# Altium footprint library FootPrintLib_8.PcbLib: 590 footprints (part 37 of 37)
Each footprint in its own frame and in the unit in brackets; x right, y up, seen from the top. Pads: shape width x height; smd on the part's side, far side on the other; paste and mask are expansions set on the pad; w line width, h text height; cw(c..) or ccw(c..) is an arc to the next point about the centre after c.
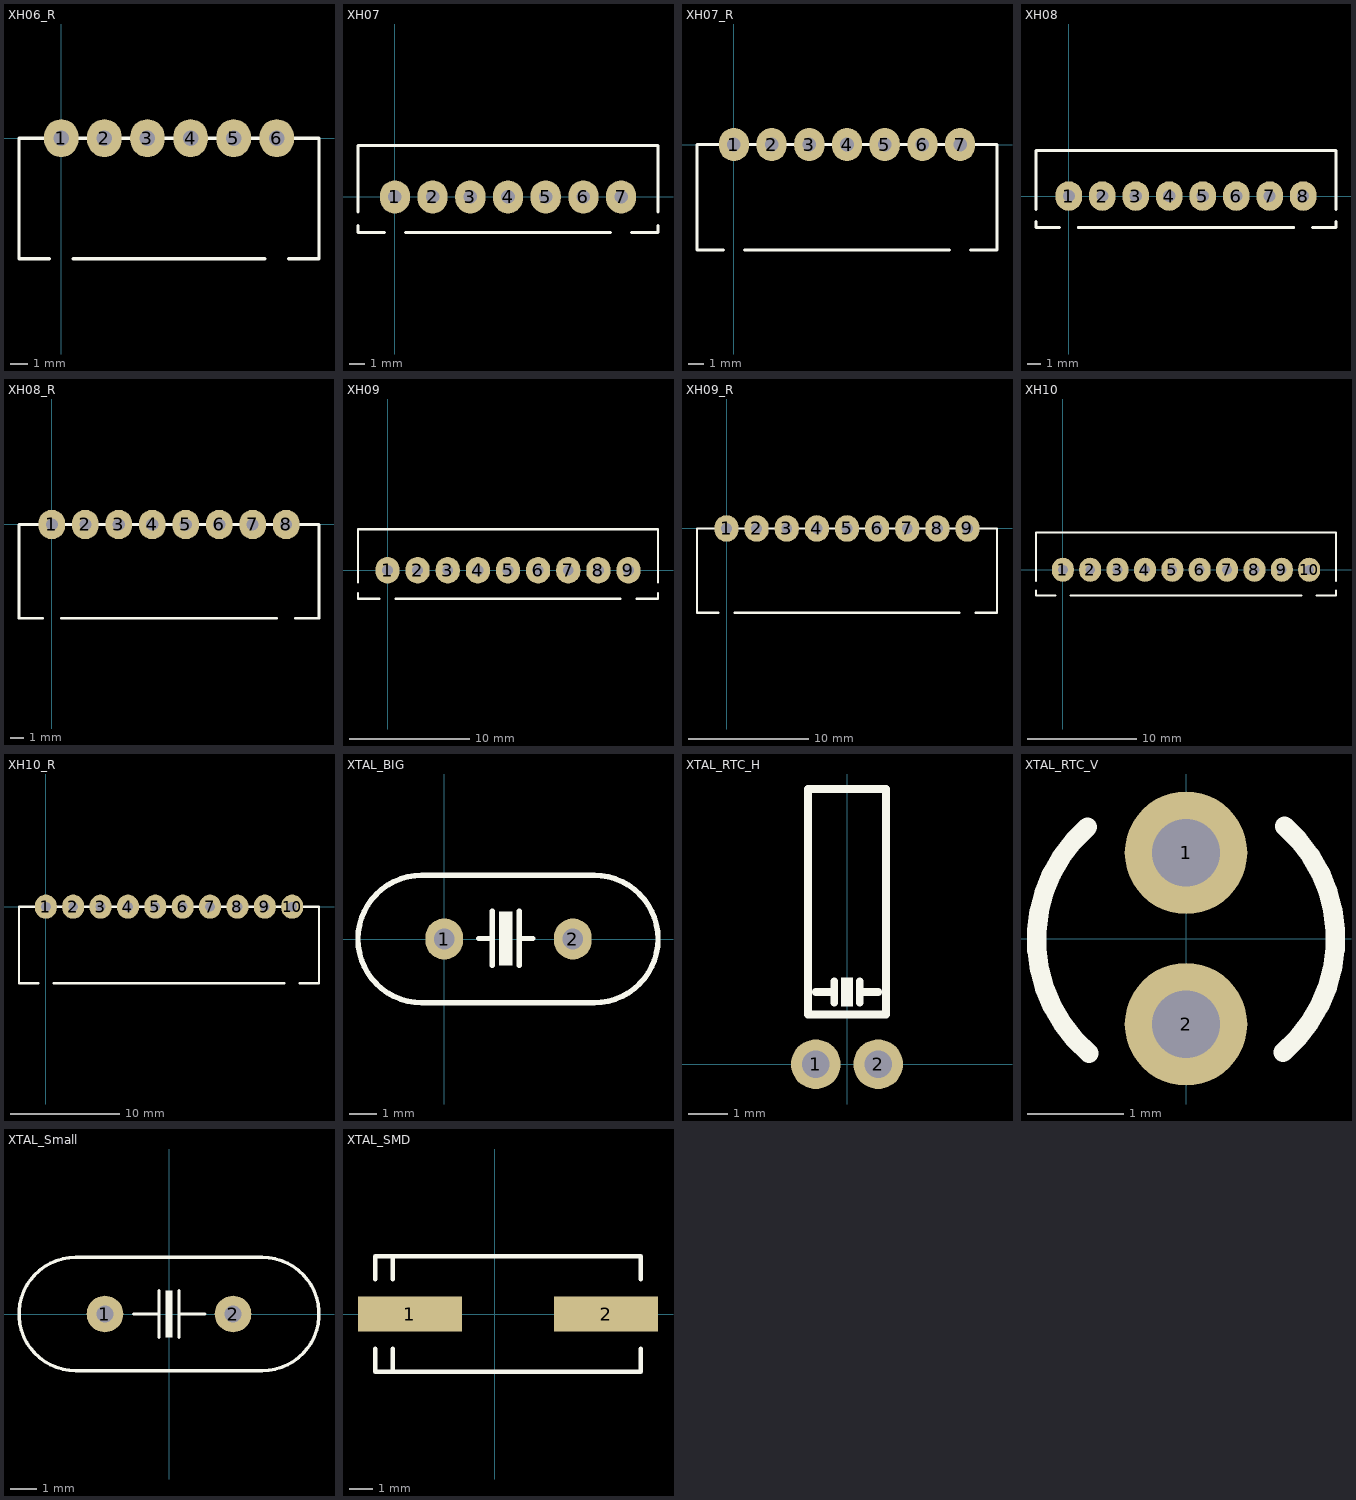
[diagram p36: the footprints below, top view; thin cyan lines are the x and y axes]

## XH06_R [mm] "XH Connector, Body 12.5 x 17.4 mm"
height 5.75
pads (6):
  oval 2x2.2 hole 0.9: 1(0,0) 2(2.5,0) 3(5,0) 4(7.5,0) 5(10,0) 6(12.5,0)
Top Overlay:
  lines w0.2: -0.7,-7 -2.45,-7 -2.45,0 14.95,0 14.95,-7 ; 0.7,-7 4.3,-7 ; 4.025,-7 9.3,-7 ; 8.2,-7 11.8,-7 ; 13.2,-7 14.925,-7
3D body: height 5.25, standoff 0.5, extent 14.95,0 14.95,0
3D body: height 5.25, standoff 0.5, extent 14.95,0 14.95,0
3D body: height 5.25, standoff 0.5, extent 14.95,0 14.95,0
3D body: height 5.25, standoff 0.5, extent -2.45,0 -2.45,0
3D body: height 5.25, standoff 0.5, extent -2.45,0 -2.45,0
3D body: height 7, standoff -3.3, extent -1.125,1.225 -1.125,1.225
3D body: height 5.25, standoff 0.5, extent -2.45,0 -2.45,0
3D body: height 5.25, standoff 0.5, extent -2.45,0 -2.45,0
3D body: height 2, standoff -2, extent -0.3,0.3 0.3,0.3
3D body: height 2, standoff -2, extent 2.2,0.3 2.8,0.3
3D body: height 2, standoff -2, extent 4.7,0.3 5.3,0.3
3D body: height 2, standoff -2, extent 7.2,0.3 7.8,0.3
3D body: height 2, standoff -2, extent 9.7,0.3 10.3,0.3
3D body: height 2, standoff -2, extent 12.2,0.3 12.8,0.3
3D body: height 5.25, standoff 0.5, extent -2.45,0 -2.45,0
3D body: height 5.25, standoff 0.5, extent -2.45,0 -2.45,0
3D body: height 5.25, standoff 0.5, extent 14.95,0 14.95,0
3D body: height 5.25, standoff 0.5, extent 14.95,0 14.95,0
3D body: height 5.25, standoff 0.5, extent -2.45,0 -2.45,0
3D body: height 5.25, standoff 0.5, extent -2.45,0 -2.45,0
3D body: height 5.25, standoff 0.5, extent 14.95,0 14.95,0
3D body: height 5.25, standoff 0.5, extent 14.95,0 14.95,0
3D body "XH06_R.step": height 5.75, standoff -2, extent -2.45,-7 14.95,0.3

## XH07 [mm] "XH Connector, Body 15 x 19.9 mm"
height 7
pads (7):
  oval 2x2.2 hole 0.9: 1(0,0) 2(2.5,0) 3(5,0) 4(7.5,0) 5(10,0) 6(12.5,0) 7(15,0)
Top Overlay:
  lines w0.2: -2.45,-1.9 -2.45,-2.35 -0.7,-2.35 ; -2.45,-1 -2.45,3.4 17.45,3.4 17.45,-1 ; 0.7,-2.35 3.375,-2.35 ; 3.3,-2.35 11.8,-2.35 ; 11.625,-2.35 14.3,-2.35 ; 15.7,-2.35 17.45,-2.35 17.45,-1.9
3D body "User Library-PW10-XX-M redPW10-7M.STEP": height 7, standoff -3.3, extent -2.55,-2.35 17.55,3.35

## XH07_R [mm] "XH Connector, Body 15 x 19.9 mm"
height 5.75
pads (7):
  oval 2x2.2 hole 0.9: 1(0,0) 2(2.5,0) 3(5,0) 4(7.5,0) 5(10,0) 6(12.5,0) 7(15,0)
Top Overlay:
  lines w0.2: -0.7,-7 -2.45,-7 -2.45,0 17.45,0 17.45,-7 ; 0.7,-7 4.3,-7 ; 4.025,-7 9.3,-7 ; 8.2,-7 11.8,-7 ; 10.7,-7 14.3,-7 ; 15.7,-7 17.425,-7
3D body: height 5.25, standoff 0.5, extent 17.45,0 17.45,0
3D body: height 5.25, standoff 0.5, extent 17.45,0 17.45,0
3D body: height 5.25, standoff 0.5, extent 17.45,0 17.45,0
3D body: height 5.25, standoff 0.5, extent -2.45,0 -2.45,0
3D body: height 5.25, standoff 0.5, extent -2.45,0 -2.45,0
3D body: height 7, standoff -3.3, extent -1.125,1.225 -1.125,1.225
3D body: height 5.25, standoff 0.5, extent -2.45,0 -2.45,0
3D body: height 5.25, standoff 0.5, extent -2.45,0 -2.45,0
3D body: height 2, standoff -2, extent -0.3,0.3 0.3,0.3
3D body: height 2, standoff -2, extent 2.2,0.3 2.8,0.3
3D body: height 2, standoff -2, extent 4.7,0.3 5.3,0.3
3D body: height 2, standoff -2, extent 7.2,0.3 7.8,0.3
3D body: height 2, standoff -2, extent 9.7,0.3 10.3,0.3
3D body: height 2, standoff -2, extent 12.2,0.3 12.8,0.3
3D body: height 2, standoff -2, extent 14.7,0.3 15.3,0.3
3D body: height 5.25, standoff 0.5, extent 17.45,0 17.45,0
3D body: height 5.25, standoff 0.5, extent 17.45,0 17.45,0
3D body: height 5.25, standoff 0.5, extent -2.45,0 -2.45,0
3D body: height 5.25, standoff 0.5, extent -2.45,0 -2.45,0
3D body: height 5.25, standoff 0.5, extent 17.45,0 17.45,0
3D body: height 5.25, standoff 0.5, extent 17.45,0 17.45,0
3D body: height 5.25, standoff 0.5, extent -2.45,0 -2.45,0
3D body: height 5.25, standoff 0.5, extent -2.45,0 -2.45,0
3D body "XH07_R.step": height 5.75, standoff -2, extent -2.45,-7 17.45,0.3

## XH08 [mm] "XH Connector, Body 17.5 x 22.4 mm"
height 7
pads (8):
  oval 2x2.2 hole 0.9: 1(0,0) 2(2.5,0) 3(5,0) 4(7.5,0) 5(10,0) 6(12.5,0) 7(15,0) 8(17.5,0)
Top Overlay:
  lines w0.2: -2.45,-1.9 -2.45,-2.35 -0.7,-2.35 ; -2.45,-1 -2.45,3.4 19.95,3.4 19.95,-1 ; 0.7,-2.35 3.375,-2.35 ; 3.3,-2.35 11.8,-2.35 ; 11.475,-2.35 16.8,-2.35 ; 18.2,-2.35 19.95,-2.35 19.95,-1.9
3D body "User Library-PW10-XX-M redPW10-8M.STEP": height 7, standoff -3.3, extent -2.55,-2.35 20.05,3.35

## XH08_R [mm] "XH Connector, Body 17.5 x 22.4 mm"
height 5.75
pads (8):
  oval 2x2.2 hole 0.9: 1(0,0) 2(2.5,0) 3(5,0) 4(7.5,0) 5(10,0) 6(12.5,0) 7(15,0) 8(17.5,0)
Top Overlay:
  lines w0.2: -0.7,-7 -2.45,-7 -2.45,0 19.95,0 19.95,-7 ; 0.7,-7 4.3,-7 ; 4.025,-7 9.3,-7 ; 8.2,-7 11.8,-7 ; 10.7,-7 14.3,-7 ; 13.2,-7 16.8,-7 ; 18.2,-7 19.925,-7
3D body: height 2, standoff -2, extent 17.2,0.3 17.8,0.3
3D body: height 2, standoff -2, extent -0.3,0.3 0.3,0.3
3D body: height 5.25, standoff 0.5, extent 19.95,0 19.95,0
3D body: height 5.25, standoff 0.5, extent 19.95,0 19.95,0
3D body: height 5.25, standoff 0.5, extent 19.95,0 19.95,0
3D body: height 5.25, standoff 0.5, extent 19.95,0 19.95,0
3D body: height 5.25, standoff 0.5, extent -2.45,0 -2.45,0
3D body: height 5.25, standoff 0.5, extent -2.45,0 -2.45,0
3D body: height 5.25, standoff 0.5, extent -2.45,0 -2.45,0
3D body: height 5.25, standoff 0.5, extent -2.45,0 -2.45,0
3D body: height 2, standoff -2, extent 14.7,0.3 15.3,0.3
3D body: height 2, standoff -2, extent 12.2,0.3 12.8,0.3
3D body: height 2, standoff -2, extent 9.7,0.3 10.3,0.3
3D body: height 2, standoff -2, extent 7.2,0.3 7.8,0.3
3D body: height 2, standoff -2, extent 4.7,0.3 5.3,0.3
3D body: height 2, standoff -2, extent 2.2,0.3 2.8,0.3
3D body: height 5.25, standoff 0.5, extent -2.45,0 -2.45,0
3D body: height 5.25, standoff 0.5, extent -2.45,0 -2.45,0
3D body: height 5.25, standoff 0.5, extent -2.45,0 -2.45,0
3D body: height 5.25, standoff 0.5, extent -2.45,0 -2.45,0
3D body: height 2, standoff -2, extent 14.7,0.3 15.3,0.3
3D body: height 2, standoff -2, extent 12.2,0.3 12.8,0.3
3D body: height 2, standoff -2, extent 9.7,0.3 10.3,0.3
3D body: height 2, standoff -2, extent 7.2,0.3 7.8,0.3
3D body: height 2, standoff -2, extent 4.7,0.3 5.3,0.3
3D body: height 2, standoff -2, extent 2.2,0.3 2.8,0.3
3D body: height 2, standoff -2, extent -0.3,0.3 0.3,0.3
3D body: height 5.25, standoff 0.5, extent -2.45,0 -2.45,0
3D body: height 5.25, standoff 0.5, extent -2.45,0 -2.45,0
3D body: height 7, standoff -3.3, extent -1.125,1.225 -1.125,1.225
3D body: height 5.25, standoff 0.5, extent -2.45,0 -2.45,0
3D body: height 5.25, standoff 0.5, extent -2.45,0 -2.45,0
3D body: height 5.25, standoff 0.5, extent 19.95,0 19.95,0
3D body: height 5.25, standoff 0.5, extent 19.95,0 19.95,0
3D body: height 5.25, standoff 0.5, extent 19.95,0 19.95,0
3D body: height 5.25, standoff 0.5, extent 19.95,0 19.95,0
3D body: height 5.25, standoff 0.5, extent 19.95,0 19.95,0
3D body: height 5.25, standoff 0.5, extent 19.95,0 19.95,0
3D body: height 5.25, standoff 0.5, extent 19.95,0 19.95,0
3D body "XH08_R.step": height 5.75, standoff -2, extent -2.45,-7 19.95,0.3

## XH09 [mm] "XH Connector, Body 20 x 24.9 mm"
height 7
pads (9):
  oval 2x2.2 hole 0.9: 1(0,0) 2(2.5,0) 3(5,0) 4(7.5,0) 5(10,0) 6(12.5,0) 7(15,0) 8(17.5,0) 9(20,0)
Top Overlay:
  lines w0.2: -2.45,-1.9 -2.45,-2.35 -0.7,-2.35 ; -2.45,-1 -2.45,3.4 22.45,3.4 22.45,-1 ; 0.7,-2.35 3.375,-2.35 ; 3.3,-2.35 11.8,-2.35 ; 11.25,-2.35 19.3,-2.35 ; 20.7,-2.35 22.45,-2.35 22.45,-1.9
3D body "User Library-PW10-XX-M red - 9.STEP": height 7, standoff -3.3, extent -2.55,-2.35 22.55,3.35

## XH09_R [mm] "XH Connector, Body 20 x 24.9 mm"
height 5.75
pads (9):
  oval 2x2.2 hole 0.9: 1(0,0) 2(2.5,0) 3(5,0) 4(7.5,0) 5(10,0) 6(12.5,0) 7(15,0) 8(17.5,0) 9(20,0)
Top Overlay:
  lines w0.2: -0.7,-7 -2.45,-7 -2.45,0 22.45,0 22.45,-7 ; 0.7,-7 4.3,-7 ; 4.025,-7 9.3,-7 ; 8.2,-7 11.8,-7 ; 10.7,-7 14.3,-7 ; 13.2,-7 16.8,-7 ; 15.7,-7 19.3,-7 ; 20.7,-7 22.425,-7
3D body: height 2, standoff -2, extent 19.7,0.3 20.3,0.3
3D body: height 2, standoff -2, extent -0.3,0.3 0.3,0.3
3D body: height 5.25, standoff 0.5, extent -2.45,0 -2.45,0
3D body: height 5.25, standoff 0.5, extent -2.45,0 -2.45,0
3D body: height 5.25, standoff 0.5, extent -2.45,0 -2.45,0
3D body: height 5.25, standoff 0.5, extent -2.45,0 -2.45,0
3D body: height 5.25, standoff 0.5, extent 22.45,0 22.45,0
3D body: height 5.25, standoff 0.5, extent 22.45,0 22.45,0
3D body: height 5.25, standoff 0.5, extent 22.45,0 22.45,0
3D body: height 5.25, standoff 0.5, extent 22.45,0 22.45,0
3D body: height 2, standoff -2, extent 17.2,0.3 17.8,0.3
3D body: height 2, standoff -2, extent 14.7,0.3 15.3,0.3
3D body: height 2, standoff -2, extent 12.2,0.3 12.8,0.3
3D body: height 2, standoff -2, extent 9.7,0.3 10.3,0.3
3D body: height 2, standoff -2, extent 7.2,0.3 7.8,0.3
3D body: height 2, standoff -2, extent 4.7,0.3 5.3,0.3
3D body: height 2, standoff -2, extent 2.2,0.3 2.8,0.3
3D body: height 5.25, standoff 0.5, extent -2.45,0 -2.45,0
3D body: height 5.25, standoff 0.5, extent -2.45,0 -2.45,0
3D body: height 7, standoff -3.3, extent -1.125,1.225 -1.125,1.225
3D body: height 5.25, standoff 0.5, extent -2.45,0 -2.45,0
3D body: height 5.25, standoff 0.5, extent -2.45,0 -2.45,0
3D body: height 2, standoff -2, extent -0.3,0.3 0.3,0.3
3D body: height 2, standoff -2, extent 2.2,0.3 2.8,0.3
3D body: height 2, standoff -2, extent 4.7,0.3 5.3,0.3
3D body: height 2, standoff -2, extent 7.2,0.3 7.8,0.3
3D body: height 2, standoff -2, extent 9.7,0.3 10.3,0.3
3D body: height 2, standoff -2, extent 12.2,0.3 12.8,0.3
3D body: height 2, standoff -2, extent 14.7,0.3 15.3,0.3
3D body: height 5.25, standoff 0.5, extent -2.45,0 -2.45,0
3D body: height 5.25, standoff 0.5, extent -2.45,0 -2.45,0
3D body: height 5.25, standoff 0.5, extent -2.45,0 -2.45,0
3D body: height 5.25, standoff 0.5, extent -2.45,0 -2.45,0
3D body: height 5.25, standoff 0.5, extent 22.45,0 22.45,0
3D body: height 5.25, standoff 0.5, extent 22.45,0 22.45,0
3D body: height 5.25, standoff 0.5, extent 22.45,0 22.45,0
3D body: height 5.25, standoff 0.5, extent 22.45,0 22.45,0
3D body: height 5.25, standoff 0.5, extent 22.45,0 22.45,0
3D body: height 5.25, standoff 0.5, extent 22.45,0 22.45,0
3D body: height 5.25, standoff 0.5, extent 22.45,0 22.45,0
3D body "XH09_R.step": height 5.75, standoff -2, extent -2.45,-7 22.45,0.3

## XH10 [mm] "XH Connector, Body 22.5 x 27.4 mm"
height 7
pads (10):
  oval 2x2.2 hole 0.9: 1(0,0) 2(2.5,0) 3(5,0) 4(7.5,0) 5(10,0) 6(12.5,0) 7(15,0) 8(17.5,0) 9(20,0) 10(22.5,0)
Top Overlay:
  lines w0.2: -2.45,-1.9 -2.45,-2.35 -0.7,-2.35 ; -2.45,-1 -2.45,3.4 24.95,3.4 24.95,-1 ; 0.7,-2.35 3.375,-2.35 ; 3.3,-2.35 11.8,-2.35 ; 11.075,-2.35 21.8,-2.35 ; 23.2,-2.35 24.95,-2.35 24.95,-1.9
3D body "User Library-PW10-XX-M red - 10.STEP": height 7, standoff -3.3, extent -2.55,-2.35 25.05,3.35

## XH10_R [mm] "XH Connector, Body 22.5 x 27.4 mm"
height 5.75
pads (10):
  oval 2x2.2 hole 0.9: 1(0,0) 2(2.5,0) 3(5,0) 4(7.5,0) 5(10,0) 6(12.5,0) 7(15,0) 8(17.5,0) 9(20,0) 10(22.5,0)
Top Overlay:
  lines w0.2: -0.7,-7 -2.45,-7 -2.45,0 24.95,0 24.95,-7 ; 0.7,-7 4.3,-7 ; 4.025,-7 9.3,-7 ; 8.2,-7 11.8,-7 ; 10.7,-7 14.3,-7 ; 13.2,-7 16.8,-7 ; 15.7,-7 19.3,-7 ; 18.2,-7 21.8,-7 ; 23.2,-7 24.925,-7
3D body "XH10_R.step": height 5.75, standoff -2, extent -2.45,-7 24.95,0.3
3D body: height 5.25, standoff 0.5, extent 24.95,0 24.95,0
3D body: height 5.25, standoff 0.5, extent 24.95,0 24.95,0
3D body: height 5.25, standoff 0.5, extent 24.95,0 24.95,0
3D body: height 5.25, standoff 0.5, extent 24.95,0 24.95,0
3D body: height 5.25, standoff 0.5, extent 24.95,0 24.95,0
3D body: height 5.25, standoff 0.5, extent 24.95,0 24.95,0
3D body: height 5.25, standoff 0.5, extent 24.95,0 24.95,0
3D body: height 5.25, standoff 0.5, extent -2.45,0 -2.45,0
3D body: height 5.25, standoff 0.5, extent -2.45,0 -2.45,0
3D body: height 7, standoff -3.3, extent -1.125,1.225 -1.125,1.225
3D body: height 5.25, standoff 0.5, extent -2.45,0 -2.45,0
3D body: height 5.25, standoff 0.5, extent -2.45,0 -2.45,0
3D body: height 2, standoff -2, extent -0.3,0.3 0.3,0.3
3D body: height 2, standoff -2, extent 2.2,0.3 2.8,0.3
3D body: height 2, standoff -2, extent 4.7,0.3 5.3,0.3
3D body: height 2, standoff -2, extent 7.2,0.3 7.8,0.3
3D body: height 2, standoff -2, extent 9.7,0.3 10.3,0.3
3D body: height 2, standoff -2, extent 12.2,0.3 12.8,0.3
3D body: height 2, standoff -2, extent 14.7,0.3 15.3,0.3
3D body: height 5.25, standoff 0.5, extent -2.45,0 -2.45,0
3D body: height 5.25, standoff 0.5, extent -2.45,0 -2.45,0
3D body: height 5.25, standoff 0.5, extent -2.45,0 -2.45,0
3D body: height 5.25, standoff 0.5, extent -2.45,0 -2.45,0
3D body: height 2, standoff -2, extent 2.2,0.3 2.8,0.3
3D body: height 2, standoff -2, extent 4.7,0.3 5.3,0.3
3D body: height 2, standoff -2, extent 7.2,0.3 7.8,0.3
3D body: height 2, standoff -2, extent 9.7,0.3 10.3,0.3
3D body: height 2, standoff -2, extent 12.2,0.3 12.8,0.3
3D body: height 2, standoff -2, extent 14.7,0.3 15.3,0.3
3D body: height 2, standoff -2, extent 17.2,0.3 17.8,0.3
3D body: height 2, standoff -2, extent 19.7,0.3 20.3,0.3
3D body: height 5.25, standoff 0.5, extent -2.45,0 -2.45,0
3D body: height 5.25, standoff 0.5, extent -2.45,0 -2.45,0
3D body: height 5.25, standoff 0.5, extent -2.45,0 -2.45,0
3D body: height 5.25, standoff 0.5, extent -2.45,0 -2.45,0
3D body: height 5.25, standoff 0.5, extent 24.95,0 24.95,0
3D body: height 5.25, standoff 0.5, extent 24.95,0 24.95,0
3D body: height 5.25, standoff 0.5, extent 24.95,0 24.95,0
3D body: height 5.25, standoff 0.5, extent 24.95,0 24.95,0
3D body: height 2, standoff -2, extent -0.3,0.3 0.3,0.3
3D body: height 2, standoff -2, extent 22.2,0.3 22.8,0.3

## XTAL_BIG [mil]
height 590.55
pads (2):
  oval 55x60 hole 30: 1(0,0) 2(187.4,0)
Top Overlay:
  rectangle: 79.53,-38.58 99.21,40.16
  lines w7.87: 50,0.79 69.69,0.79 ; 69.69,-38.58 69.69,40.16 ; 109.06,-38.58 109.06,40.16 ; 109.06,0.79 128.74,0.79 ; -32.68,-92.91 cw(c-32.68,0) -32.68,92.91 218.5,92.91 cw(c218.5,0) 218.5,-92.91 -32.68,-92.91
3D body "Part5.STEP": height 514.25, standoff -94.02, extent -130.71,-93.7 316.14,95.28

## XTAL_RTC_H [mm]
height 6
pads (2):
  round 1.27 hole 0.7: 1(-0.8,0) 2(0.8,0)
Top Overlay:
  region: 0.15,2.225 -0.15,2.225 -0.15,1.475 0.15,1.475
  lines w0.2: -0.8,1.85 -0.325,1.85 ; -0.325,1.575 -0.325,1.85 ; -0.325,2.125 -0.325,1.85 ; 0.325,1.575 0.325,1.85 ; 0.325,2.125 0.325,1.85 ; 0.8,1.85 0.325,1.85 ; -1,1.275 1,1.275 1,7.05 -1,7.05 -1,1.275
3D body "User Library-DT-26-1.STEP": height 2, standoff -2, extent -1,-0.12 1,7.02

## XTAL_RTC_V [mm]
pads (2):
  round 1.27 hole 0.7: 1(0,0.889) 2(0,-0.889)
Top Overlay:
  lines w0.2: -1.022,1.155 ccw(c0,-0.01) -1.006,-1.189 ; 1.006,-1.179 ccw(c0,0) 1.022,1.165
3D body "Crystal TH.STEP": height 8.98, standoff -1.8, extent -1.6,-1.725 1.6,1.725

## XTAL_Small [mil]
pads (2):
  round 55 hole 25: 1(-96.06,0) 2(96.06,0)
Top Overlay:
  rectangle: -5,-35 5,35
  lines w5: -53,0 -15,0 ; -15,-35 -15,35 ; 15,-35 15,35 ; 15,0 54,0 ; -140,-85 cw(c-140,0) -140,85 140,85 cw(c140,0) 140,-85 -140,-85
3D body "Crystal-3.8mm.STEP": height 140.16, standoff -78.74, extent -226.38,-88.58 226.38,88.58

## XTAL_SMD [mm]
pads (2):
  rect 4.5x1.5 smd: 1(-3.683,0) 2(4.817,0)
Top Overlay:
  lines w0.2: -5.183,-1.5 -5.183,-2.5 6.317,-2.5 6.317,-1.5 ; -5.183,1.5 -5.183,2.5 6.317,2.5 6.317,1.5 ; -4.433,-2.5 -4.433,-1.5 ; -4.433,1.5 -4.433,2.5
3D body "User Library-HC49_SMD.STEP": height 5.18, standoff 0, extent -5.642,-2.25 6.658,2.25